# Altium schematic symbol library USB.SchLib: 1 symbol
Pins are listed as number, name and electrical type; pins without a type are passive.

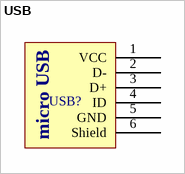
[diagram p0: symbol USB]

## USB
designator USB?  (value not drawn)
footprint micro_USB_typeB
footprint USB A-FEMALE
pins: 1 VCC, 2 D-, 3 D+, 4 ID, 5 GND, 6 Shield
text: micro USB